# Altium schematic symbol library TLV1701QDBVRQ1.SchLib: 1 symbol
Pins are listed as number, name and electrical type; pins without a type are passive.

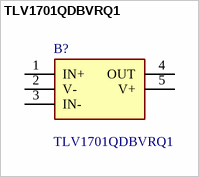
[diagram p0: symbol TLV1701QDBVRQ1]

## TLV1701QDBVRQ1
designator B?
Automotive single high voltage, low power comparator<br />&nbsp;; Manufacturer_Name: Texas Instruments; Geometry.Height: 1.45mm; Mouser Part Number: 595-TLV1701QDBVRQ1; Mouser Price/Stock: https://www.mouser.co.uk/ProductDetail/Texas-Instruments/TLV1701QDBVRQ1?qs=1mbolxNpo8e2XkJB1BnFXA%3D%3D; Manufacturer_Part_Number: TLV1701QDBVRQ1; Datasheet Link: http://www.ti.com/lit/gpn/tlv1701-q1
footprint SOT95P280X145-5N
pins: 1 IN+, 2 V-, 3 IN-, 4 OUT, 5 V+ (power)